# EAGLE library part ABP2DANT100PG2A3XX (library ABP2DANT100PG2A3XX)
Pressure Sensor 100PSI (689.48kPa) Gauge Male - 0.11" (2.79mm) Tube 14 b 6-DIP (0.453", 11.50mm), Top Port Source: Datasheet <https://prod-edam.honeywell.com/content/dam/honeywell-edam/sps/siot/en-us/products/sensors/pressure-sensors/board-mount-pressure-sensors/basic-abp2-series/documents/sps-siot-abp2-series-datasheet-32350268-en.pdf?download=false>
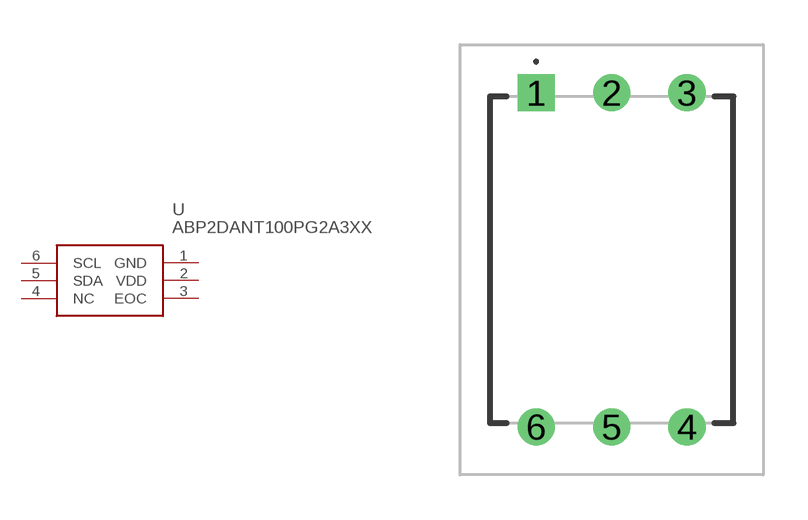
[diagram p0: symbol with the pads of ABP2DANT100PG2A3XX; footprint ABP2DANT100PG2A3XX]

Designator prefix U

## ABP2DANT100PG2A3XX (Description: Pressure Sensor 100PSI (689.48kPa) Gauge Male - 0.11" (2.79mm) Tube 14 b 6-DIP (0.453", 11.50mm), Top Port; Height: 14.4mm; Manufacturer_Name: Honeywell; Manufacturer_Part_Number: ABP2DANT100PG2A3XX; Mouser_Part_Number: 785-P2DANT100PG2A3XX; Mouser_Price-Stock: https://www.mouser.co.uk/ProductDetail/Honeywell/ABP2DANT100PG2A3XX?qs=iLbezkQI%252BsjuQframA4BWQ%3D%3D)  [ABP2DANT100PG2A3XX]
1  GND
2  VDD
3  EOC
4  NC  nc
5  SDA
6  SCL

## Footprint ABP2DANT100PG2A3XX (pad centres in mm)
ABP2DANT100PG2A3XX-1
drill 0.73 pad 1.251 square: 1 0,0
drill 0.73 pad 1.251: 2 2.54,0; 3 5.08,0; 4 5.08,-11.25; 5 2.54,-11.25; 6 0,-11.25